# Altium footprint library ECE362.PcbLib: 9 footprints
Each footprint in its own frame and in the unit in brackets; x right, y up, seen from the top. Pads: shape width x height; smd on the part's side, far side on the other; paste and mask are expansions set on the pad; w line width, h text height; cw(c..) or ccw(c..) is an arc to the next point about the centre after c.
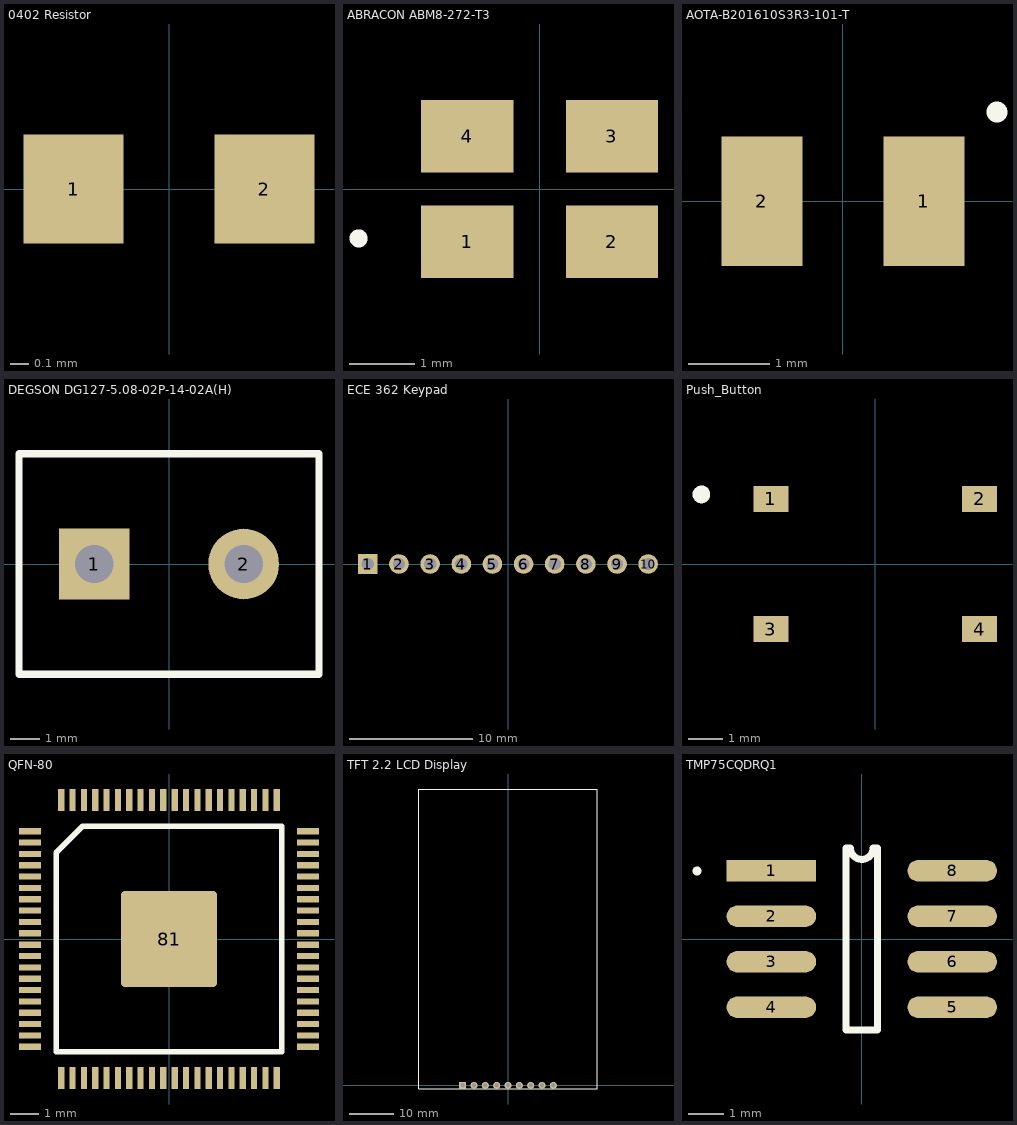
[diagram p0: the footprints below, top view; thin cyan lines are the x and y axes]

## 0402 Resistor [mm] "0402 Thick Film"
pads (2):
  rect 0.55x0.6 smd mask+0.05: 1(-0.525,0) 2(0.525,0)

## ABRACON ABM8-272-T3 [mm] "Ultra Miniature Ceramic SMD Crystal"
pads (4):
  rect 1.4x1.1 smd mask+0.05: 1(-1.1,-0.8) 2(1.1,-0.8) 3(1.1,0.8) 4(-1.1,0.8)
Top Overlay:
  circle w0.254: c-2.75,-0.75 r0.01

## AOTA-B201610S3R3-101-T [mm] "3.3uH Inductor for the RP2350"
pads (2):
  rect 1x1.6 smd mask+0.05: 1(1,0) 2(-1,0)
Top Overlay:
  circle w0.254: c1.9,1.1 r0.001

## DEGSON DG127-5.08-02P-14-02A(H) [mm]
pads (2):
  rect 2.4x2.4 hole 1.3 mask+0.05: 1(-2.54,0)
  round 2.4 hole 1.3 mask+0.05: 2(2.54,0)
Top Overlay:
  lines w0.254: -5.1,-3.75 5.1,-3.75 5.1,3.75 -5.1,3.75 -5.1,-3.75

## ECE 362 Keypad [mm]
pads (10):
  rect 1.6x1.6 hole 1 mask+0.05: 1(-11.43,0)
  round 1.6 hole 1 mask+0.05: 2(-8.89,0) 3(-6.35,0) 4(-3.81,0) 5(-1.27,0) 6(1.27,0) 7(3.81,0) 8(6.35,0) 9(8.89,0) 10(11.43,0)

## Push_Button [mm] "XKB Connection TS-1187A-B-A-B"
pads (4):
  rect 1x0.75 smd mask+0.05: 1(-3,1.875) 2(3,1.875) 3(-3,-1.875) 4(3,-1.875)
Top Overlay:
  circle w0.254: c-5,2 r0.127

## QFN-80 [mm]
pads (81):
  rect 0.78x0.22 smd mask+0.05: 1(-4.897,3.8) 2(-4.897,3.4) 3(-4.897,3) 4(-4.897,2.6) 5(-4.897,2.2) 6(-4.897,1.8) 7(-4.897,1.4) 8(-4.897,1) 9(-4.897,0.6) 10(-4.897,0.2) 11(-4.897,-0.2) 12(-4.897,-0.6) 13(-4.897,-1) 14(-4.897,-1.4) 15(-4.897,-1.8) 16(-4.897,-2.2) 17(-4.897,-2.6) 18(-4.897,-3) 19(-4.897,-3.4) 20(-4.897,-3.8) 41(4.897,-3.8) 42(4.897,-3.4) 43(4.897,-3) 44(4.897,-2.6) 45(4.897,-2.2) 46(4.897,-1.8) 47(4.897,-1.4) 48(4.897,-1) 49(4.897,-0.6) 50(4.897,-0.2) 51(4.897,0.2) 52(4.897,0.6) 53(4.897,1) 54(4.897,1.4) 55(4.897,1.8) 56(4.897,2.2) 57(4.897,2.6) 58(4.897,3) 59(4.897,3.4) 60(4.897,3.8)
  rect 0.22x0.78 smd mask+0.05: 21(-3.8,-4.897) 22(-3.4,-4.897) 23(-3,-4.897) 24(-2.6,-4.897) 25(-2.2,-4.897) 26(-1.8,-4.897) 27(-1.4,-4.897) 28(-1,-4.897) 29(-0.6,-4.897) 30(-0.2,-4.897) 31(0.2,-4.897) 32(0.6,-4.897) 33(1,-4.897) 34(1.4,-4.897) 35(1.8,-4.897) 36(2.2,-4.897) 37(2.6,-4.897) 38(3,-4.897) 39(3.4,-4.897) 40(3.8,-4.897) 61(3.8,4.897) 62(3.4,4.897) 63(3,4.897) 64(2.6,4.897) 65(2.2,4.897) 66(1.8,4.897) 67(1.4,4.897) 68(1,4.897) 69(0.6,4.897) 70(0.2,4.897) 71(-0.2,4.897) 72(-0.6,4.897) 73(-1,4.897) 74(-1.4,4.897) 75(-1.8,4.897) 76(-2.2,4.897) 77(-2.6,4.897) 78(-3,4.897) 79(-3.4,4.897) 80(-3.8,4.897)
  rrect10% 3.4x3.4 smd mask+0.05: 81(0,0)
Top Overlay:
  lines w0.2: -3.972,-3.972 -3.972,3.047 -3.047,3.972 3.972,3.972 3.972,-3.972 -3.972,-3.972

## TFT 2.2 LCD Display [mm]
height 2.35
pads (9):
  rect 1.6x1.6 hole 1 mask+0.05: 1(-10.16,0)
  round 1.6 hole 1 mask+0.05: 2(-7.62,0) 3(-5.08,0) 4(-2.54,0) 5(0,0) 6(2.54,0) 7(5.08,0) 8(7.62,0) 9(10.16,0)
Top Overlay:
  lines w0.254: -20.05,-0.75 20.05,-0.75 20.05,66.45 -20.05,66.45 -20.05,-0.75

## TMP75CQDRQ1 [mm] "-40℃~+125℃ SMBus ±0.25℃ SOP-8 Analog and Digital Output"
pads (8):
  rect 2.5x0.6 smd mask+0.05: 1(-2.525,1.905)
  oval 2.5x0.6 smd mask+0.05: 2(-2.525,0.635) 3(-2.525,-0.635) 4(-2.525,-1.905) 5(2.525,-1.905) 6(2.525,-0.635) 7(2.525,0.635) 8(2.525,1.905)
Top Overlay:
  lines w0.2: -0.44,-2.54 0.44,-2.54 0.44,2.54 0.318,2.54 cw(c0,2.54) -0.318,2.54 -0.44,2.54 -0.44,-2.54
  lines w0.254: -4.599,1.9 ccw(c-4.6,1.9) -4.599,1.9